# Altium schematic symbol library CL31B106KAHNNNE.SchLib: 1 symbol
Pins are listed as number, name and electrical type; pins without a type are passive.

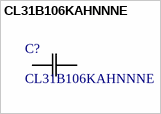
[diagram p0: symbol CL31B106KAHNNNE]

## CL31B106KAHNNNE
designator C?
Description; Manufacturer_Name: Samsung; Copyright: Copyright (C) 2025 Ultra Librarian. All rights reserved.; Manufacturer_Part_Number: CL31B106KAHNNNE
footprint CAP_CL31_SAM
pins: 1, 2